# Altium schematic symbol library DMP6110SVT-7.SchLib: 1 symbol
Pins are listed as number, name and electrical type; pins without a type are passive.

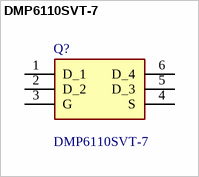
[diagram p0: symbol DMP6110SVT-7]

## DMP6110SVT-7
designator Q?
MOSFET 60V P-Ch Enh FET 60Vds 20Vgs; Manufacturer_Name: Diodes Incorporated; Geometry.Height: 1mm; Manufacturer_Part_Number: DMP6110SVT-7; Mouser Part Number: 621-DMP6110SVT-7; Mouser Price/Stock: https://www.mouser.co.uk/ProductDetail/Diodes-Incorporated/DMP6110SVT-7?qs=AsTZqt%2FmeqnnPpRJnDG6UQ%3D%3D; Arrow Part Number: DMP6110SVT-7; Arrow Price/Stock: https://www.arrow.com/en/products/dmp6110svt-7/diodes-incorporated?region=nac; Datasheet Link: https://www.diodes.com/assets/Datasheets/DMP6110SVT.pdf
footprint SOT95P280X100-6N
pins: 1 D_1, 2 D_2, 3 G, 4 S, 5 D_3, 6 D_4